# Altium integrated library SSK02-FPH-254-A6.IntLib: 1 symbol
Pins are listed as number, name and electrical type; pins without a type are passive.

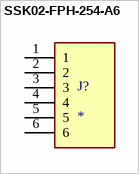
[diagram p0: symbol SSK02-FPH-254-A6]

## SSK02-FPH-254-A6
designator J?
6 Position Header Connector 0.100 (2.54mm) Through Hole Gold; MF: Same Sky (Formerly CUI Devices); MP: SSK02-FPH-254-A6; SnapEDA_Link: https://www.snapeda.com/parts/SSK02-FPH-254-A6/Same+Sky/view-part/?ref=snap; Package: None; Value: *; Check_prices: https://www.snapeda.com/parts/SSK02-FPH-254-A6/Same+Sky/view-part/?ref=eda
footprint SAMESKY_SSK02-FPH-254-A6
pins: 1, 2, 3, 4, 5, 6